# Altium footprint library WE-RJ45 LAN.PcbLib: 106 footprints (part 4 of 7)
Each footprint in its own frame and in the unit in brackets; x right, y up, seen from the top. Pads: shape width x height; smd on the part's side, far side on the other; paste and mask are expansions set on the pad; w line width, h text height; cw(c..) or ccw(c..) is an arc to the next point about the centre after c.
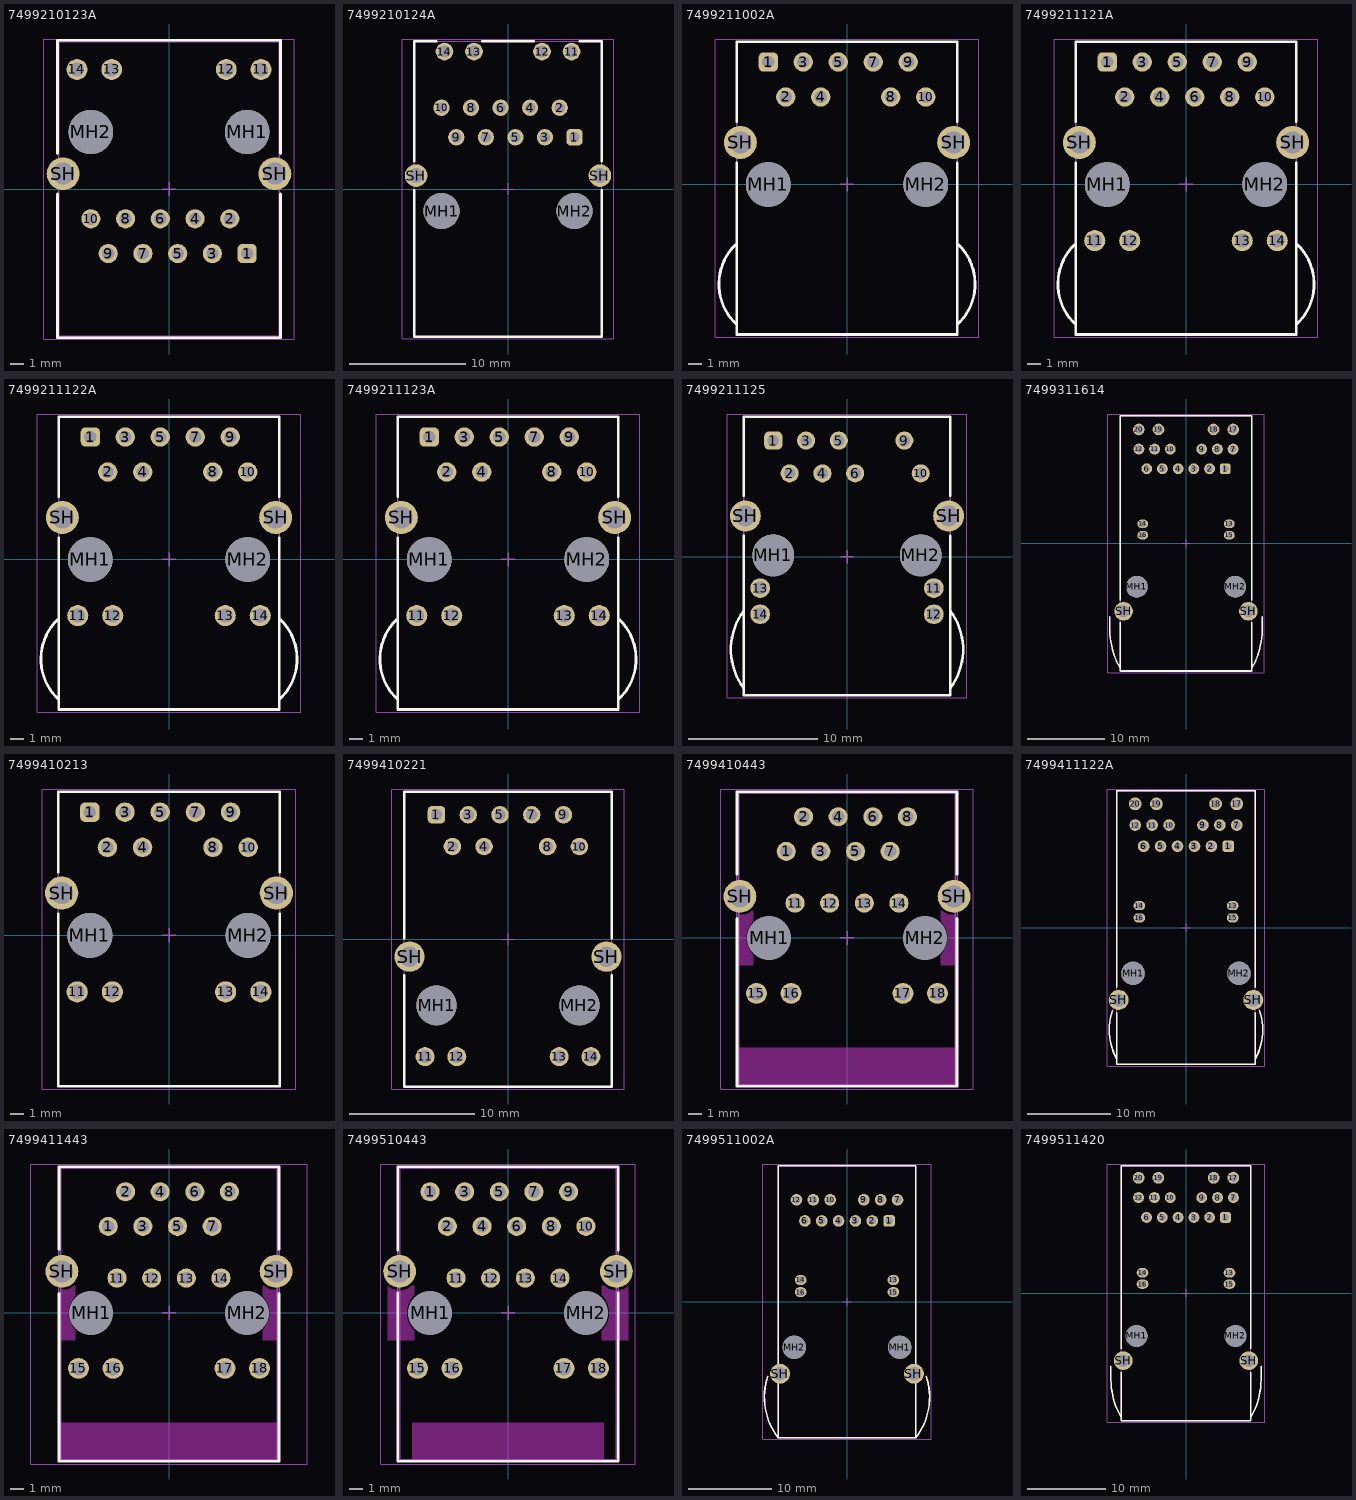
[diagram p3: the footprints below, top view; thin cyan lines are the x and y axes]

## 7499210123A [mm] "LAN Transformer, body 21.54 x 16.10 mm"
height 16.65
pads (18):
  rrect50% 1.4x1.4 hole 0.9: 1(5.715,-4.72)
  round 1.4 hole 0.9: 2(4.445,-2.18) 3(3.175,-4.72) 4(1.905,-2.18) 5(0.635,-4.72) 6(-0.635,-2.18) 7(-1.905,-4.72) 8(-3.175,-2.18) 9(-4.445,-4.72) 10(-5.715,-2.18)
  round 1.52 hole 1.02: 11(6.73,8.74) 12(4.19,8.74) 13(-4.19,8.74) 14(-6.73,8.74)
  round 3.25 hole 3.25 unplated: MH1(5.715,4.17) MH2(-5.715,4.17)
  round 2.4 hole 1.6: SH(-7.745,1.12) SH(7.745,1.12)
Top Overlay:
  lines w0.2: -8.15,-0.36 -8.15,-10.87 8.15,-10.87 8.15,-0.36 ; -8.15,2.6 -8.15,10.87 8.15,10.87 8.15,2.6
Top Assembly:
  lines w0.1: -8.05,-10.77 8.05,-10.77 8.05,10.77 -8.05,10.77 -8.05,-10.77
Top Designator:
  text ".Designator" at -3.647,-0.357 h1
Top 3D Body:
  lines w0.1: -8.05,-10.77 8.05,-10.77 8.05,10.77 -8.05,10.77 -8.05,-10.77
Top Courtyard:
  lines w0.05: -9.145,-10.97 -9.145,10.97 9.145,10.97 9.145,-10.97 -9.145,-10.97
Top Component Center:
  lines w0.1: -0.5,0 0.5,0 ; 0,-0.5 0,0.5
3D body "7499210123A.stp": height 16.69, standoff -3.3, extent -8.34,-10.77 8.34,10.77

## 7499210124A [mm] "LAN Transformer, body 25.3x16.2mm"
height 13.5
pads (18):
  rrect50% 1.4x1.4 hole 0.9: 1(5.715,4.45)
  round 1.4 hole 0.9: 2(4.445,6.99) 3(3.175,4.45) 4(1.905,6.99) 5(0.635,4.45) 6(-0.635,6.99) 7(-1.905,4.45) 8(-3.175,6.99) 9(-4.445,4.45) 10(-5.715,6.99)
  round 1.52 hole 1.02: 11(5.465,11.82) 12(2.925,11.82) 13(-2.925,11.82) 14(-5.465,11.82)
  round 3.1 hole 3.1 unplated: MH1(-5.715,-1.9) MH2(5.715,-1.9)
  round 1.95 hole 1.3: SH(-7.9,1.15) SH(7.9,1.15)
Top Overlay:
  lines w0.2: -8.05,-0.1 -8.05,-12.7 8.05,-12.7 8.05,-0.1 ; -8.05,2.4 -8.05,12.7 -6.15,12.7 ; -2.24,12.7 2.24,12.7 ; 6.15,12.7 8.05,12.7 8.05,2.4
Top Assembly:
  lines w0.1: -8.05,-12.7 8.05,-12.7 8.05,12.7 -8.05,12.7 -8.05,-12.7
Top Designator:
  text ".Designator" at -3.647,-0.357 h1
Top 3D Body:
  lines w0.1: -8.05,-12.7 8.05,-12.7 8.05,12.7 -8.05,12.7 -8.05,-12.7
Top Courtyard:
  lines w0.05: -9.075,-12.9 -9.075,12.9 9.075,12.9 9.075,-12.9 -9.075,-12.9
Top Component Center:
  lines w0.1: -0.5,0 0.5,0 ; 0,-0.5 0,0.5
3D body "7499210124A.stp": height 13.55, standoff -3.25, extent -8.2,-12.7 8.2,12.7

## 7499211002A [mm] "Integrated RJ45 Transformer, THT, body 16.00 x 21.25 mm"
height 13.5
pads (13):
  rrect50% 1.4x1.4 hole 0.9: 1(-5.715,8.89)
  round 1.4 hole 0.9: 2(-4.445,6.35) 3(-3.175,8.89) 4(-1.905,6.35) 5(-0.635,8.89) 7(1.905,8.89) 8(3.175,6.35) 9(4.445,8.89) 10(5.715,6.35)
  round 3.25 hole 3.25 unplated: MH1(-5.715,0) MH2(5.715,0)
  round 2.4 hole 1.6: SH(-7.745,3.05) SH(7.745,3.05)
Top Overlay:
  lines w0.2: -8.099,-4.377 ccw(c-5.31,-7.23) -8.001,-10.176 ; -8,1.55 -8,-10.89 8,-10.89 8,1.55 ; -8,4.55 -8,10.36 8,10.36 8,4.55 ; 8.001,-10.176 ccw(c5.31,-7.23) 8.099,-4.377
Top Assembly:
  lines w0.1: -8.099,-4.377 ccw(c-5.31,-7.23) -8.001,-10.176 ; 8.001,-10.176 ccw(c5.31,-7.23) 8.099,-4.377 ; -8,-10.89 8,-10.89 8,10.36 -8,10.36 -8,-10.89
Top Designator:
  text ".Designator" at -3.647,-0.357 h1
Top 3D Body:
  lines w0.1: -8.099,-4.377 ccw(c-5.31,-7.23) -8.001,-10.176 ; 8.001,-10.176 ccw(c5.31,-7.23) 8.099,-4.377 ; -8,-10.89 8,-10.89 8,10.36 -8,10.36 -8,-10.89
Top Courtyard:
  lines w0.05: -9.548,-11.09 9.548,-11.09 9.548,10.56 -9.548,10.56 -9.548,-11.09
Top Component Center:
  lines w0.1: -0.5,0 0.5,0 ; 0,-0.5 0,0.5
3D body "7499211002A.stp": height 14.85, standoff -3.6, extent -9.348,-10.89 9.348,10.36

## 7499211121A [mm] "LAN Transformer, body 21.84x15.88mm"
height 13.95
pads (18):
  rrect50% 1.4x1.4 hole 0.9: 1(-5.715,8.89)
  round 1.4 hole 0.9: 2(-4.445,6.35) 3(-3.175,8.89) 4(-1.905,6.35) 5(-0.635,8.89) 6(0.635,6.35) 7(1.905,8.89) 8(3.175,6.35) 9(4.445,8.89) 10(5.715,6.35)
  round 1.53 hole 1.03: 11(-6.625,-4.08) 12(-4.085,-4.08) 13(4.085,-4.08) 14(6.625,-4.08)
  round 3.25 hole 3.25 unplated: MH1(-5.715,0) MH2(5.715,0)
  round 2.4 hole 1.6: SH(-7.745,3.05) SH(7.745,3.05)
Top Overlay:
  lines w0.2: -8.099,-4.377 ccw(c-5.31,-7.23) -8.001,-10.176 ; -8,1.55 -8,-10.89 8,-10.89 8,1.55 ; -8,4.55 -8,10.36 8,10.36 8,4.55 ; 8.001,-10.176 ccw(c5.31,-7.23) 8.099,-4.377
Top Assembly:
  lines w0.1: -8.099,-4.377 ccw(c-5.31,-7.23) -8.001,-10.176 ; 8.001,-10.176 ccw(c5.31,-7.23) 8.099,-4.377 ; -8,-10.89 8,-10.89 8,10.36 -8,10.36 -8,-10.89
Top Designator:
  text ".Designator" at -3.647,-0.357 h1
Top 3D Body:
  lines w0.1: -8.099,-4.377 ccw(c-5.31,-7.23) -8.001,-10.176 ; 8.001,-10.176 ccw(c5.31,-7.23) 8.099,-4.377 ; -8,-10.89 8,-10.89 8,10.36 -8,10.36 -8,-10.89
Top Courtyard:
  lines w0.05: -9.548,-11.09 9.548,-11.09 9.548,10.56 -9.548,10.56 -9.548,-11.09
Top Component Center:
  lines w0.1: -0.5,0 0.5,0 ; 0,-0.5 0,0.5
3D body "7499211121A.stp": height 14.9, standoff -3.55, extent -9.348,-10.89 9.348,10.36

## 7499211122A [mm] "RJ45 LAN Transformer, body 16.00 x 21.25 mm"
height 13.5
pads (17):
  rrect50% 1.4x1.4 hole 0.9: 1(-5.715,8.89)
  round 1.4 hole 0.9: 2(-4.445,6.35) 3(-3.175,8.89) 4(-1.905,6.35) 5(-0.635,8.89) 7(1.905,8.89) 8(3.175,6.35) 9(4.445,8.89) 10(5.715,6.35)
  round 1.53 hole 1.03: 11(-6.625,-4.08) 12(-4.085,-4.08) 13(4.085,-4.08) 14(6.625,-4.08)
  round 3.25 hole 3.25 unplated: MH1(-5.715,0) MH2(5.715,0)
  round 2.4 hole 1.6: SH(-7.745,3.05) SH(7.745,3.05)
Top Overlay:
  lines w0.2: -8.099,-4.377 ccw(c-5.31,-7.23) -8.001,-10.176 ; -8,1.55 -8,-10.89 8,-10.89 8,1.55 ; -8,4.55 -8,10.36 8,10.36 8,4.55 ; 8.001,-10.176 ccw(c5.31,-7.23) 8.099,-4.377
Top Assembly:
  lines w0.1: -8.099,-4.377 ccw(c-5.31,-7.23) -8.001,-10.176 ; 8.001,-10.176 ccw(c5.31,-7.23) 8.099,-4.377 ; -8,-10.89 -8,10.36 8,10.36 8,-10.89 -8,-10.89
Top Designator:
  text ".Designator" at -3.647,-0.357 h1
Top 3D Body:
  lines w0.1: -8.099,-4.377 ccw(c-5.31,-7.23) -8.001,-10.176 ; 8.001,-10.176 ccw(c5.31,-7.23) 8.099,-4.377 ; -8,-10.89 -8,10.36 8,10.36 8,-10.89 -8,-10.89
Top Courtyard:
  lines w0.05: -9.548,-11.09 -9.548,10.56 9.548,10.56 9.548,-11.09 -9.548,-11.09
Top Component Center:
  lines w0.1: -0.5,0 0.5,0 ; 0,-0.5 0,0.5
3D body "7499211122A.stp": height 14.9, standoff -3.55, extent -9.348,-10.89 9.348,10.36

## 7499211123A [mm] "Integrated RJ45 Transformer, THT, body 16.00 x 21.25 mm"
height 13.5
pads (17):
  rrect50% 1.4x1.4 hole 0.9: 1(-5.715,8.89)
  round 1.4 hole 0.9: 2(-4.445,6.35) 3(-3.175,8.89) 4(-1.905,6.35) 5(-0.635,8.89) 7(1.905,8.89) 8(3.175,6.35) 9(4.445,8.89) 10(5.715,6.35)
  round 1.53 hole 1.03: 11(-6.625,-4.08) 12(-4.085,-4.08) 13(4.085,-4.08) 14(6.625,-4.08)
  round 3.25 hole 3.25 unplated: MH1(-5.715,0) MH2(5.715,0)
  round 2.4 hole 1.6: SH(-7.745,3.05) SH(7.745,3.05)
Top Overlay:
  lines w0.2: -8.099,-4.377 ccw(c-5.31,-7.23) -8.001,-10.176 ; -8,1.55 -8,-10.89 8,-10.89 8,1.55 ; -8,4.55 -8,10.36 8,10.36 8,4.55 ; 8.001,-10.176 ccw(c5.31,-7.23) 8.099,-4.377
Top Assembly:
  lines w0.1: -8.099,-4.377 ccw(c-5.31,-7.23) -8.001,-10.176 ; 8.001,-10.176 ccw(c5.31,-7.23) 8.099,-4.377 ; -8,-10.89 -8,10.36 8,10.36 8,-10.89 -8,-10.89
Top Designator:
  text ".Designator" at -3.647,-0.357 h1
Top 3D Body:
  lines w0.1: -8.099,-4.377 ccw(c-5.31,-7.23) -8.001,-10.176 ; 8.001,-10.176 ccw(c5.31,-7.23) 8.099,-4.377 ; -8,-10.89 -8,10.36 8,10.36 8,-10.89 -8,-10.89
Top Courtyard:
  lines w0.05: -9.548,-11.09 -9.548,10.56 9.548,10.56 9.548,-11.09 -9.548,-11.09
Top Component Center:
  lines w0.1: -0.5,0 0.5,0 ; 0,-0.5 0,0.5
3D body "7499211123A.stp": height 14.85, standoff -3.6, extent -9.348,-10.89 9.348,10.36

## 7499211125 [mm] "LAN Transformer, body 21.3x16mm"
height 13.55
pads (16):
  rrect50% 1.4x1.4 hole 0.89: 1(-5.715,8.99)
  round 1.4 hole 0.89: 2(-4.445,6.45) 3(-3.175,8.99) 4(-1.905,6.45) 5(-0.635,8.99) 6(0.635,6.45) 9(4.445,8.99) 10(5.715,6.45)
  round 1.52 hole 1.02: 11(6.725,-2.44) 12(6.725,-4.47) 13(-6.725,-2.44) 14(-6.725,-4.47)
  round 3.25 hole 3.25 unplated: MH1(-5.715,0.1) MH2(5.715,0.1)
  round 2.4 hole 1.6: SH(-7.875,3.15) SH(7.875,3.15)
Top Overlay:
  lines w0.2: -8,-10.2 cw(c-4,-7.2) -8,-4.2 ; -8,1.6 -8,-10.75 8,-10.75 8,1.6 ; -8,4.7 -8,10.85 8,10.85 8,4.7 ; 8,-10.2 ccw(c4,-7.2) 8,-4.2
Top Assembly:
  lines w0.1: -8,-10.2 cw(c-4,-7.2) -8,-4.2 ; 8,-10.2 ccw(c4,-7.2) 8,-4.2 ; -8,-10.75 -8,10.85 8,10.85 8,-10.75 ; -8,-10.75 8,-10.75 ; -8,-10.75 8,-10.75
Top Designator:
  text ".Designator" at -3.647,-0.357 h1
Top 3D Body:
  lines w0.1: -8,-10.2 cw(c-4,-7.2) -8,-4.2 ; 8,-10.2 ccw(c4,-7.2) 8,-4.2 ; -8,-10.75 -8,10.85 8,10.85 8,-10.75 ; -8,-10.75 8,-10.75 ; -8,-10.75 8,-10.75
Top Courtyard:
  lines w0.05: -9.275,-10.95 9.275,-10.95 9.275,11.05 -9.275,11.05 -9.275,-10.95
Top Component Center:
  lines w0.1: -0.5,0 0.5,0 ; 0,-0.5 0,0.5
3D body "7499211125.stp": height 14.65, standoff -2.98, extent -8.956,-10.75 8.956,10.85

## 7499311614 [mm] "10/100/1000 Base-T, PoE, THT, 1x1, Tab up, with shield tabs, with LED L-R green/orange-yellow, ETR"
height 13.87
pads (24):
  rrect50% 1.4x1.4 hole 0.89: 1(5.075,9.63)
  round 1.4 hole 0.89: 2(3.045,9.63) 3(1.015,9.63) 4(-1.015,9.63) 5(-3.045,9.63) 6(-5.075,9.63) 7(6.09,12.17) 8(4.06,12.17) 9(2.03,12.17) 10(-2.03,12.17) 11(-4.06,12.17) 12(-6.09,12.17)
  oval 1.4x1.1 hole 0.89: 13(5.59,2.51) 14(-5.59,2.51) 15(5.59,1.05) 16(-5.59,1.05)
  round 1.5 hole 1.02: 17(6.095,14.71) 18(3.555,14.71) 19(-3.555,14.71) 20(-6.095,14.71)
  round 2.8 hole 2.8 unplated: MH1(-6.35,-5.61) MH2(6.35,-5.61)
  round 2.4 hole 1.57: SH(-8.065,-8.79) SH(8.065,-8.79)
Top Overlay:
  lines w0.2: -9.857,-9.51 -9.857,-11.238 ccw(c1.3,-10.91) -9.621,-13.217 ccw(c-1.503,-11.736) -8.5,-16.11 ; -8.5,-10.21 -8.5,-16.51 8.5,-16.51 8.5,-10.21 ; -8.5,-7.37 -8.5,16.51 8.5,16.51 8.5,-7.37 ; 8.5,-16.11 ccw(c1.503,-11.736) 9.621,-13.217 ccw(c-1.3,-10.91) 9.857,-11.238 9.857,-9.51
Top Assembly:
  lines w0.1: -9.857,-9.51 -9.857,-11.238 ccw(c1.3,-10.91) -9.621,-13.217 ccw(c-1.503,-11.736) -8.5,-16.11 ; 8.5,-16.11 ccw(c1.503,-11.736) 9.621,-13.217 ccw(c-1.3,-10.91) 9.857,-11.238 9.857,-9.51 ; -8.5,-16.51 -8.5,16.51 8.5,16.51 8.5,-16.51 -8.5,-16.51
Top Designator:
  text ".Designator" at -3.647,-0.357 h1
Top 3D Body:
  lines w0.1: -9.857,-9.51 -9.857,-11.238 ccw(c1.3,-10.91) -9.621,-13.217 ccw(c-1.503,-11.736) -8.5,-16.11 ; 8.5,-16.11 ccw(c1.503,-11.736) 9.621,-13.217 ccw(c-1.3,-10.91) 9.857,-11.238 9.857,-9.51 ; -8.5,-16.51 -8.5,16.51 8.5,16.51 8.5,-16.51 -8.5,-16.51
Top Courtyard:
  lines w0.05: -10.09,-16.71 -10.09,16.71 10.09,16.71 10.09,-16.71 -10.09,-16.71
Top Component Center:
  lines w0.1: -0.5,0 0.5,0 ; 0,-0.5 0,0.5
3D body "7499311614.stp": height 15.53, standoff -3.32, extent -9.89,-16.51 9.89,16.51

## 7499410213 [mm] "Integrated RJ45 Transformer, THT, body 16.00 x 21.25 mm"
height 13.5
pads (17):
  rrect50% 1.4x1.4 hole 0.9: 1(-5.715,8.89)
  round 1.4 hole 0.9: 2(-4.445,6.35) 3(-3.175,8.89) 4(-1.905,6.35) 5(-0.635,8.89) 7(1.905,8.89) 8(3.175,6.35) 9(4.445,8.89) 10(5.715,6.35)
  round 1.53 hole 1.03: 11(-6.625,-4.08) 12(-4.085,-4.08) 13(4.085,-4.08) 14(6.625,-4.08)
  round 3.25 hole 3.25 unplated: MH1(-5.715,0) MH2(5.715,0)
  round 2.4 hole 1.6: SH(-7.745,3.05) SH(7.745,3.05)
Top Overlay:
  lines w0.2: -8,1.55 -8,-10.89 8,-10.89 8,1.55 ; -8,4.55 -8,10.36 8,10.36 8,4.55
Top Assembly:
  lines w0.1: -8,-10.89 8,-10.89 8,10.36 -8,10.36 -8,-10.89
Top Designator:
  text ".Designator" at -3.647,-0.357 h1
Top 3D Body:
  lines w0.1: -8,-10.89 8,-10.89 8,10.36 -8,10.36 -8,-10.89
Top Courtyard:
  lines w0.05: -9.145,-11.09 9.145,-11.09 9.145,10.56 -9.145,10.56 -9.145,-11.09
Top Component Center:
  lines w0.1: -0.5,0 0.5,0 ; 0,-0.5 0,0.5
3D body "7499410213.stp": height 13.5, standoff -3.6, extent -8.15,-10.89 8.15,10.36

## 7499410221 [mm] "LAN Transformer, body 23.6x16.6mm"
height 17.1
pads (17):
  rrect50% 1.4x1.4 hole 0.89: 1(-5.72,9.94)
  round 1.4 hole 0.89: 2(-4.45,7.4) 3(-3.18,9.94) 4(-1.91,7.4) 5(-0.64,9.94) 7(1.9,9.94) 8(3.17,7.4) 9(4.44,9.94) 10(5.71,7.4)
  round 1.52 hole 1.02: 11(-6.635,-9.41) 12(-4.095,-9.41) 13(4.095,-9.41) 14(6.635,-9.41)
  round 3.2 hole 3.2 unplated: MH1(-5.715,-5.3) MH2(5.715,-5.3)
  round 2.43 hole 1.63: SH(-7.875,-1.41) SH(7.875,-1.41)
Top Overlay:
  lines w0.2: -8.3,-2.9 -8.3,-11.8 8.3,-11.8 8.3,-2.9 ; -8.3,0.05 -8.3,11.8 8.3,11.8 8.3,0.05
Top Assembly:
  lines w0.1: -8.3,-11.8 8.3,-11.8 8.3,11.8 -8.3,11.8 -8.3,-11.8
Top Designator:
  text ".Designator" at -3.647,-0.357 h1
Top 3D Body:
  lines w0.1: -8.3,-11.8 8.3,-11.8 8.3,11.8 -8.3,11.8 -8.3,-11.8
Top Courtyard:
  lines w0.05: -9.29,-12 -9.29,12 9.29,12 9.29,-12 -9.29,-12
Top Component Center:
  lines w0.1: -0.5,0 0.5,0 ; 0,-0.5 0,0.5
3D body "7499410221.stp": height 17.55, standoff -2.9, extent -8.3,-11.8 8.3,11.8

## 7499410443 [mm] "WE-RJ45LAN"
height 13.65
pads (20):
  round 1.4 hole 0.9: 1(-4.457,6.35) 2(-3.187,8.89) 3(-1.917,6.35) 4(-0.647,8.89) 5(0.623,6.35) 6(1.893,8.89) 7(3.163,6.35) 8(4.433,8.89) 11(-3.81,2.56) 12(-1.27,2.56) 13(1.27,2.56) 14(3.81,2.56)
  round 1.53 hole 1.02: 15(-6.64,-4.06) 16(-4.1,-4.06) 17(4.1,-4.06) 18(6.64,-4.06)
  round 3.1 hole 3.25 unplated: MH1(-5.715,0) MH2(5.715,0)
  round 2.4 hole 1.6: SH(-7.85,3.05) SH(7.85,3.05)
Top Layer keep-out:
  region: 7.95,-2 6.875,-2 6.875,-1.25 6.992,-1.121 7.184,-0.833 7.317,-0.513 7.384,-0.173 7.384,0.173 7.317,0.513 7.184,0.833 6.992,1.121 6.875,1.25 6.875,2 6.975,2 7.079,1.92 7.308,1.794 7.559,1.717 7.819,1.693 7.95,1.7
  region: -7.95,-2 -6.875,-2 -6.875,-1.25 -6.992,-1.121 -7.184,-0.833 -7.317,-0.513 -7.384,-0.173 -7.384,0.173 -7.317,0.513 -7.184,0.833 -6.992,1.121 -6.875,1.25 -6.875,2 -6.975,2 -7.079,1.92 -7.308,1.794 -7.559,1.717 -7.819,1.693 -7.95,1.7
  region: -8.05,-10.75 8.05,-10.75 8.05,-8.05 -8.05,-8.05
Top Overlay:
  lines w0.2: -8.075,1.425 -8.075,-10.875 8.075,-10.875 8.075,1.425 ; -8.075,4.675 -8.075,10.725 8.075,10.725 8.075,4.675
Top Assembly:
  lines w0.1: -8.075,-10.875 8.075,-10.875 8.075,10.725 -8.075,10.725 -8.075,-10.875
Top Designator:
  text ".Designator" at -3.647,-0.357 h1
Top 3D Body:
  lines w0.1: -7.95,-10.75 7.95,-10.75 7.95,10.6 -7.95,10.6 -7.95,-10.75
Top Courtyard:
  lines w0.05: -9.25,-11.075 -9.25,10.925 9.25,10.925 9.25,-11.075 -9.25,-11.075
Top Component Center:
  lines w0.1: -0.5,0 0.5,0 ; 0,-0.5 0,0.5
3D body "7499410443.stp": height 13.65, standoff -3.78, extent -8.15,-10.75 8.15,10.6

## 7499411122A [mm] "LAN Transformer, body 33.02x17mm"
height 13.87
pads (24):
  rrect50% 1.4x1.4 hole 0.9: 1(5.075,9.74)
  round 1.4 hole 0.9: 2(3.045,9.74) 3(1.015,9.74) 4(-1.015,9.74) 5(-3.045,9.74) 6(-5.075,9.74) 7(6.09,12.28) 8(4.06,12.28) 9(2.03,12.28) 10(-2.03,12.28) 11(-4.06,12.28) 12(-6.09,12.28)
  oval 1.4x1.1 hole 0.9: 13(5.59,2.62) 14(-5.59,2.62) 15(5.59,1.16) 16(-5.59,1.16)
  round 1.53 hole 1.03: 17(6.09,14.82) 18(3.55,14.82) 19(-3.55,14.82) 20(-6.09,14.82)
  round 2.8 hole 2.8 unplated: MH1(-6.35,-5.5) MH2(6.35,-5.5)
  round 2.4 hole 1.6: SH(-8.065,-8.68) SH(8.065,-8.68)
Top Overlay:
  lines w0.2: -8.82,-10.01 ccw(c-2.15,-12.3) -8.3,-15.75 ; -8.3,-10.2 -8.3,-16.4 8.3,-16.4 8.3,-10.2 ; -8.3,-7.16 -8.3,16.4 8.3,16.4 8.3,-7.16 ; 8.3,-15.75 ccw(c2.15,-12.3) 8.82,-10.01
Top Assembly:
  lines w0.1: -8.3,-15.75 cw(c-2.15,-12.3) -8.3,-8.85 ; 8.3,-15.75 ccw(c2.15,-12.3) 8.3,-8.85 ; -8.3,-16.4 -8.3,16.4 8.3,16.4 8.3,-16.4 -8.3,-16.4
Top Designator:
  text ".Designator" at -3.647,-0.357 h1
Top 3D Body:
  lines w0.1: -8.3,-15.75 cw(c-2.15,-12.3) -8.3,-8.85 ; 8.3,-15.75 ccw(c2.15,-12.3) 8.3,-8.85 ; -8.3,-16.4 -8.3,16.4 8.3,16.4 8.3,-16.4 -8.3,-16.4
Top Courtyard:
  lines w0.05: -9.465,-16.6 -9.465,16.6 9.465,16.6 9.465,-16.6 -9.465,-16.6
Top Component Center:
  lines w0.1: -0.5,0 0.5,0 ; 0,-0.5 0,0.5
3D body "7499411122A.stp": height 14.67, standoff -3, extent -9.193,-16.4 9.193,16.4

## 7499411443 [mm] "WE-RJ45LAN"
height 15.42
pads (20):
  round 1.4 hole 0.9: 1(-4.457,6.35) 2(-3.187,8.89) 3(-1.917,6.35) 4(-0.647,8.89) 5(0.623,6.35) 6(1.893,8.89) 7(3.163,6.35) 8(4.433,8.89) 11(-3.81,2.56) 12(-1.27,2.56) 13(1.27,2.56) 14(3.81,2.56)
  round 1.53 hole 1.02: 15(-6.64,-4.06) 16(-4.1,-4.06) 17(4.1,-4.06) 18(6.64,-4.06)
  round 3.1 hole 3.25 unplated: MH1(-5.715,0) MH2(5.715,0)
  round 2.4 hole 1.6: SH(-7.85,3.05) SH(7.85,3.05)
Top Layer keep-out:
  region: 7.95,-2 6.875,-2 6.875,-1.25 6.992,-1.121 7.184,-0.833 7.317,-0.513 7.384,-0.173 7.384,0.173 7.317,0.513 7.184,0.833 6.992,1.121 6.875,1.25 6.875,2 6.975,2 7.079,1.92 7.308,1.794 7.559,1.717 7.819,1.693 7.95,1.7
  region: -7.95,-2 -6.875,-2 -6.875,-1.25 -6.992,-1.121 -7.184,-0.833 -7.317,-0.513 -7.384,-0.173 -7.384,0.173 -7.317,0.513 -7.184,0.833 -6.992,1.121 -6.875,1.25 -6.875,2 -6.975,2 -7.079,1.92 -7.308,1.794 -7.559,1.717 -7.819,1.693 -7.95,1.7
  region: -8.05,-10.75 8.05,-10.75 8.05,-8.05 -8.05,-8.05
Top Overlay:
  lines w0.2: -8.075,1.425 -8.075,-10.875 8.075,-10.875 8.075,1.425 ; -8.075,4.675 -8.075,10.725 8.075,10.725 8.075,4.675
Top Assembly:
  lines w0.1: -8.075,-10.875 8.075,-10.875 8.075,10.725 -8.075,10.725 -8.075,-10.875
Top Designator:
  text ".Designator" at -3.647,-0.357 h1
Top 3D Body:
  lines w0.1: -7.95,-10.75 7.95,-10.75 7.95,10.6 -7.95,10.6 -7.95,-10.75
Top Courtyard:
  lines w0.05: -10.151,-11.075 -10.151,10.925 10.151,10.925 10.151,-11.075 -10.151,-11.075
Top Component Center:
  lines w0.1: -0.5,0 0.5,0 ; 0,-0.5 0,0.5
3D body "7499411443.stp": height 15.75, standoff -3.68, extent -9.951,-10.75 9.951,10.6

## 7499510443 [mm] "WE-RJ45LAN"
height 13.65
pads (22):
  round 1.4 hole 0.9: 1(-5.715,8.89) 2(-4.445,6.35) 3(-3.175,8.89) 4(-1.905,6.35) 5(-0.635,8.89) 6(0.635,6.35) 7(1.905,8.89) 8(3.175,6.35) 9(4.445,8.89) 10(5.715,6.35) 11(-3.81,2.56) 12(-1.27,2.56) 13(1.27,2.56) 14(3.81,2.56)
  round 1.53 hole 1.02: 15(-6.64,-4.06) 16(-4.1,-4.06) 17(4.1,-4.06) 18(6.64,-4.06)
  round 3.15 hole 3.25 unplated: MH1(-5.715,0) MH2(5.715,0)
  round 2.4 hole 1.6: SH(-7.95,3.05) SH(7.95,3.05)
Top Layer keep-out:
  region: 8.825,-2 8.825,2 8.735,1.918 8.533,1.784 8.309,1.691 8.071,1.644 7.829,1.644 7.591,1.691 7.367,1.784 7.165,1.918 7.075,2 6.875,2 6.875,1.35 7.001,1.211 7.209,0.9 7.352,0.554 7.425,0.187 7.425,-0.187 7.352,-0.554 7.209,-0.9 7.001,-1.211 6.875,-1.35 6.875,-2
  region: -8.825,-2 -8.825,2 -8.735,1.918 -8.533,1.784 -8.309,1.691 -8.071,1.644 -7.829,1.644 -7.591,1.691 -7.367,1.784 -7.165,1.918 -7.075,2 -6.875,2 -6.875,1.35 -7.001,1.211 -7.209,0.9 -7.352,0.554 -7.425,0.187 -7.425,-0.187 -7.352,-0.554 -7.209,-0.9 -7.001,-1.211 -6.875,-1.35 -6.875,-2
  region: -7.005,-10.75 7.005,-10.75 7.005,-8.05 -7.005,-8.05
Top Overlay:
  lines w0.2: -8.075,1.475 -8.075,-10.875 8.075,-10.875 8.075,1.475 ; -8.075,4.625 -8.075,10.725 8.075,10.725 8.075,4.625
Top Assembly:
  lines w0.1: -8.075,-10.875 8.075,-10.875 8.075,10.725 -8.075,10.725 -8.075,-10.875
Top Designator:
  text ".Designator" at -3.647,-0.357 h1
Top 3D Body:
  lines w0.1: -7.95,-10.75 -7.95,10.6 7.95,10.6 7.95,-10.75 -7.95,-10.75
Top Courtyard:
  lines w0.05: -9.35,-11.075 9.35,-11.075 9.35,10.925 -9.35,10.925 -9.35,-11.075
Top Component Center:
  lines w0.1: -0.5,0 0.5,0 ; 0,-0.5 0,0.5
3D body "7499510443.stp": height 13.65, standoff -3.75, extent -8.15,-10.75 8.15,10.6

## 7499511002A [mm] "LAN Transformer, body 33.02x17.02mm"
height 13.87
pads (20):
  rrect50% 1.4x1.4 hole 0.9: 1(5.075,9.74)
  round 1.4 hole 0.9: 2(3.045,9.74) 3(1.015,9.74) 4(-1.015,9.74) 5(-3.045,9.74) 6(-5.075,9.74) 7(6.09,12.28) 8(4.06,12.28) 9(2.03,12.28) 10(-2.03,12.28) 11(-4.06,12.28) 12(-6.09,12.28)
  oval 1.4x1.2 hole 0.9: 13(5.59,2.62) 14(-5.59,2.62) 15(5.59,1.16) 16(-5.59,1.16)
  round 2.8 hole 2.8 unplated: MH1(6.35,-5.5) MH2(-6.35,-5.5)
  round 2.4 hole 1.6: SH(-8.065,-8.68) SH(8.065,-8.68)
Top Overlay:
  lines w0.2: -9.557,-8.983 ccw(c-1.9,-11.5) -8.3,-16.4 ; 9.557,-8.983 cw(c1.9,-11.5) 8.3,-16.4 ; -8.3,-16.4 -8.3,16.4 8.3,16.4 8.3,-16.4 ; -8.3,-16.4 8.3,-16.4
Top Assembly:
  lines w0.1: -9.557,-8.983 ccw(c-1.9,-11.5) -8.3,-16.4 ; 9.557,-8.983 cw(c1.9,-11.5) 8.3,-16.4 ; -8.3,-16.4 -8.3,16.4 8.3,16.4 8.3,-16.4 ; -8.3,-16.4 8.3,-16.4
Top Designator:
  text ".Designator" at -3.647,-0.357 h1
Top 3D Body:
  lines w0.1: -9.557,-8.983 ccw(c-1.9,-11.5) -8.3,-16.4 ; 9.557,-8.983 cw(c1.9,-11.5) 8.3,-16.4 ; -8.3,-16.4 -8.3,16.4 8.3,16.4 8.3,-16.4 ; -8.3,-16.4 8.3,-16.4
Top Courtyard:
  lines w0.05: -10.149,-16.6 10.149,-16.6 10.149,16.6 -10.149,16.6 -10.149,-16.6
Top Component Center:
  lines w0.1: -0.5,0 0.5,0 ; 0,-0.5 0,0.5
3D body "7499511002A.stp": height 15.43, standoff -3.58, extent -9.949,-16.4 9.949,16.4

## 7499511420 [mm] "10/100/1000 Base-T, PoE+, THT, 1x1, Tab up, with shield tabs, with LED L-R green/yellow-green/yellow"
height 13.87
pads (24):
  rrect50% 1.4x1.4 hole 0.9: 1(5.075,9.74)
  round 1.4 hole 0.9: 2(3.045,9.74) 3(1.015,9.74) 4(-1.015,9.74) 5(-3.045,9.74) 6(-5.075,9.74) 7(6.09,12.28) 8(4.06,12.28) 9(2.03,12.28) 10(-2.03,12.28) 11(-4.06,12.28) 12(-6.09,12.28)
  oval 1.5x1.2 hole 0.9: 13(5.59,2.62) 14(-5.59,2.62) 15(5.59,1.16) 16(-5.59,1.16)
  round 1.5 hole 1.02: 17(6.09,14.82) 18(3.55,14.82) 19(-3.55,14.82) 20(-6.09,14.82)
  round 2.8 hole 2.8 unplated: MH1(-6.35,-5.5) MH2(6.35,-5.5)
  round 2.4 hole 1.6: SH(-8.065,-8.68) SH(8.065,-8.68)
Top Overlay:
  lines w0.2: -9.657,-9.4 -9.657,-11.128 ccw(c1.5,-10.8) -9.421,-13.107 ccw(c-1.303,-11.626) -8.3,-16 ; -8.3,-10.2 -8.3,-16.4 8.3,-16.4 8.3,-10.2 ; -8.3,-7.16 -8.3,16.4 8.3,16.4 8.3,-7.16 ; 8.3,-16 ccw(c1.303,-11.626) 9.421,-13.107 ccw(c-1.5,-10.8) 9.657,-11.128 9.657,-9.4
Top Assembly:
  lines w0.1: -9.657,-9.4 -9.657,-11.128 ccw(c1.5,-10.8) -9.421,-13.107 ccw(c-1.303,-11.626) -8.3,-16 ; 8.3,-16 ccw(c1.303,-11.626) 9.421,-13.107 ccw(c-1.5,-10.8) 9.657,-11.128 9.657,-9.4 ; -8.3,-16.4 -8.3,16.4 8.3,16.4 8.3,-16.4 -8.3,-16.4
Top Designator:
  text ".Designator" at -3.647,-0.357 h1
Top 3D Body:
  lines w0.1: -9.657,-9.4 -9.657,-11.128 ccw(c1.5,-10.8) -9.421,-13.107 ccw(c-1.303,-11.626) -8.3,-16 ; 8.3,-16 ccw(c1.303,-11.626) 9.421,-13.107 ccw(c-1.5,-10.8) 9.657,-11.128 9.657,-9.4 ; -8.3,-16.4 -8.3,16.4 8.3,16.4 8.3,-16.4 -8.3,-16.4
Top Courtyard:
  lines w0.05: -10.115,-16.6 10.115,-16.6 10.115,16.6 -10.115,16.6 -10.115,-16.6
Top Component Center:
  lines w0.1: -0.5,0 0.5,0 ; 0,-0.5 0,0.5
3D body "7499511420.stp": height 15.23, standoff -3.66, extent -9.915,-16.4 9.915,16.4